# Altium footprint library Pads.PcbLib: 1 footprints
Each footprint in its own frame and in the unit in brackets; x right, y up, seen from the top. Pads: shape width x height; smd on the part's side, far side on the other; paste and mask are expansions set on the pad; w line width, h text height; cw(c..) or ccw(c..) is an arc to the next point about the centre after c.
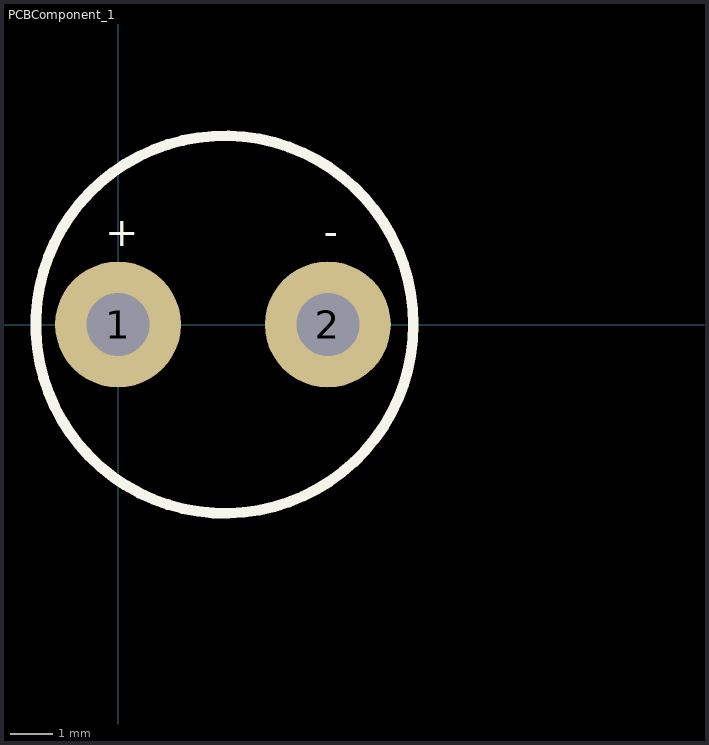
[diagram p0: the footprint, top view; thin cyan lines are the x and y axes]

## PCBComponent_1 [mm]
pads (2):
  round 3 hole 1.5: 1(0,0) 2(5,0)
Top Layer:
  pour cut-out: 13.208,-6.858
Top Overlay:
  circle w0.254: c2.54,0 r4.5
  text "+" at -0.308,1.861 h0.7
  text "-" at 4.899,1.882 h0.7
3D body "dos_cilindros_9x3_ejes5mm.step": height 9, standoff 0, extent -1.488,-1.497 6.5,1.497